# Altium schematic symbol library 0805AA101KAT2A.SchLib: 1 symbol
Pins are listed as number, name and electrical type; pins without a type are passive.

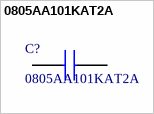
[diagram p0: symbol 0805AA101KAT2A]

## 0805AA101KAT2A
designator C?
100 pF ±10% 1000V (1kV) Ceramic Capacitor C0G, NP0 0805 (2012 Metric); Manufacturer_Name: KYOCERA AVX; Copyright: Copyright (C) 2026 Ultra Librarian. All rights reserved.; Manufacturer_Part_Number: 0805AA101KAT2A
footprint CAP_08051A0R8CAT2A_AVX
footprint CAP_08051A0R8CAT2A_AVX
pins: 1, 2